# Altium integrated library SN74LVC1T45DCKRG4.IntLib: 1 symbol
Pins are listed as number, name and electrical type; pins without a type are passive.

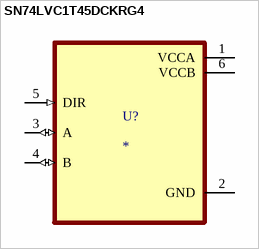
[diagram p0: symbol SN74LVC1T45DCKRG4]

## SN74LVC1T45DCKRG4
designator U?
Single-Bit Dual-Supply Bus Transceiver with Configurable Voltage-Level Shifting and 3-State Outputs 6-SC70 -40 to 85; MF: Texas Instruments; MP: SN74LVC1T45DCKRG4; SnapEDA_Link: https://www.snapeda.com/parts/SN74LVC1T45DCKRG4/Texas+Instruments/view-part/?ref=snap; Package: SOT-SC70-6 Texas Instruments; Value: *; Check_prices: https://www.snapeda.com/parts/SN74LVC1T45DCKRG4/Texas+Instruments/view-part/?ref=eda
footprint SOT65P210X110-6N
pins: 1 VCCA (power), 2 GND (power), 3 A (io), 4 B (io), 5 DIR (in), 6 VCCB (power)